# Altium footprint library Connectors.PcbLib: 319 footprints (part 14 of 20)
Each footprint in its own frame and in the unit in brackets; x right, y up, seen from the top. Pads: shape width x height; smd on the part's side, far side on the other; paste and mask are expansions set on the pad; w line width, h text height; cw(c..) or ccw(c..) is an arc to the next point about the centre after c.
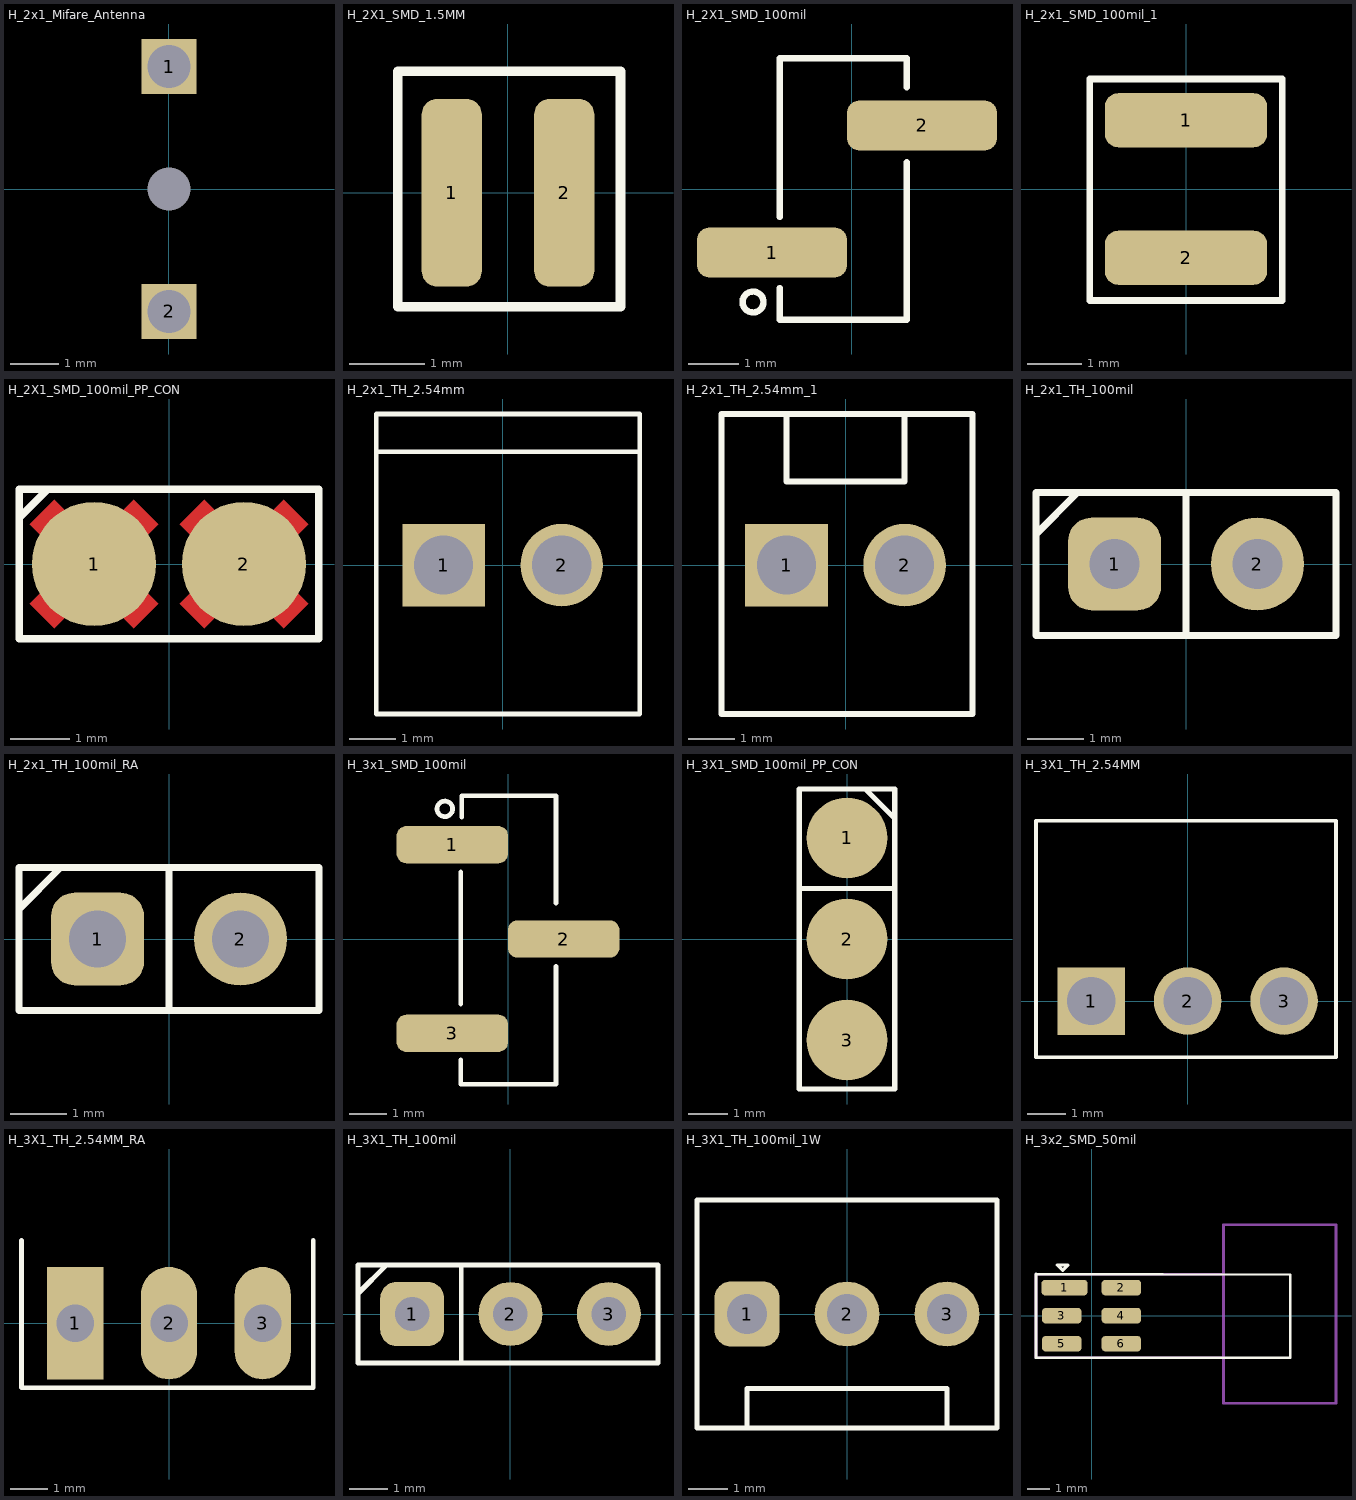
[diagram p13: the footprints below, top view; thin cyan lines are the x and y axes]

## H_2x1_Mifare_Antenna [mil] "/ 20190920 / M-X.Arias"
pads (3):
  rect 45x45 hole 35: 1(0,100) 2(0,-100)
  round 32 hole 35 unplated paste-99999 mask+4: ""(0,0)

## H_2X1_SMD_1.5MM [mm] "/20210114/J-E.Pachon"
pads (2):
  rrect50% 0.8x2.5 smd: 1(-0.75,0) 2(0.75,0)
Top Overlay:
  lines w0.127: -1.47,-1.52 -1.47,1.62 1.5,1.62 1.5,-1.52 -1.47,-1.52

## H_2X1_SMD_100mil [mm] "/ 20221215 / J-A.Sepulveda"
pads (2):
  rrect50% 3x1 smd: 1(-1.6,-1.27) 2(1.4,1.27)
Top Overlay:
  circle w0.127: c-1.98,-2.261 r0.209
  lines w0.127: -1.446,-1.981 -1.446,-2.616 1.094,-2.616 1.094,0.533 ; -1.446,-0.559 -1.446,2.616 1.094,2.616 1.094,2.032
3D body "CONN HEADER SMD 2POS 2.54MM.stp": height 9.66, standoff 0.01, extent -2.5,-2.525 2.3,2.525

## H_2x1_SMD_100mil_1 [mm] "/ 20210701 / J-E.Pachon"
pads (2):
  rrect50% 3x1 smd: 1(0,1.27) 2(0,-1.27)
Top Overlay:
  lines w0.127: -1.778,-2.057 1.778,-2.057 1.778,2.032 -1.778,2.032 -1.778,-2.057

## H_2X1_SMD_100mil_PP_CON [mm] "/ 20190222 / C-A.Serna.A"
pads (2):
  round 2.1 smd mask-0.05: 1(-1.27,0) 2(1.27,0)
Top Layer:
  region: 2.366,0.672 1.942,1.096 0.174,-0.672 0.598,-1.096
  region: 1.942,-1.096 2.366,-0.672 0.598,1.096 0.174,0.672
  region: -0.598,-1.096 -0.174,-0.672 -1.942,1.096 -2.366,0.672
  region: -2.366,-0.672 -1.942,-1.096 -0.174,0.672 -0.598,1.096
Top Overlay:
  lines w0.127: -2.535,0.785 -2.06,1.26 ; -2.54,-1.27 -2.54,1.27 2.54,1.27 2.54,-1.27 -2.54,-1.27

## H_2x1_TH_2.54mm [mil] "/ 20200520 / J-E.Pachon"
pads (2):
  rect 70x70 hole 50: 1(-50,0)
  round 70 hole 50: 2(50,0)
Top Overlay:
  lines w3.94: -107,96 114,96 ; -107,-126 -107,128 116,128 116,-126 -107,-126
3D body "022232021.stp": height 395.5, standoff -164.5, extent -95.12,-127.08 98.88,122.92

## H_2x1_TH_2.54mm_1 [mil] "/ 20220804 / J-E.Pachon"
pads (2):
  rect 70x70 hole 50: 1(-50,0)
  round 70 hole 50: 2(50,0)
Top Overlay:
  lines w5: -50,128 -50,70.87 50,70.87 50,128 ; -105.12,-126 -105.12,128 107.48,128 107.48,-126 -105.12,-126
3D body "022272021.stp": height 461.13, standoff -139.65, extent -98.81,-114.17 101.19,114.18

## H_2x1_TH_100mil [mil] "/ 20190222 / C-A.Serna.A"
pads (2):
  rrect50% 65x65 hole 35: 1(-50,0)
  round 65 hole 35: 2(50,0)
Top Overlay:
  lines w5: -105,20.87 -75.87,50 ; 0,-50 0,50 ; -105,-50 105,-50 105,50 -105,50 -105,-50

## H_2x1_TH_100mil_RA [mil] "/ 20190515/ V-A.Patino"
pads (2):
  rrect50% 65x65 hole 40: 1(-50,0)
  round 65 hole 40: 2(50,0)
Top Overlay:
  lines w5: -105,20.87 -75.87,50 ; 0,-50 0,50 ; -105,-50 105,-50 105,50 -105,50 -105,-50
3D body "022289020.stp": height 98.5, standoff -134.5, extent -100.4,-22.12 99.6,402.38

## H_3x1_SMD_100mil [mm] "/ 20190222 / C-A.Serna.A"
pads (3):
  rrect50% 3x1 smd: 1(-1.5,2.54) 2(1.5,0) 3(-1.5,-2.54)
Top Overlay:
  circle w0.127: c-1.702,3.505 r0.209
  lines w0.127: -1.27,-3.912 -1.27,-3.251 ; -1.27,-1.753 -1.27,1.803 ; -1.245,-3.912 1.295,-3.912 1.295,-0.737 ; -1.245,3.277 -1.245,3.861 1.295,3.861 1.295,0.965

## H_3X1_SMD_100mil_PP_CON [mil] "/ 20190222 / C-A.Serna.A"
pads (3):
  round 80 smd: 1(0,100) 2(0,0) 3(0,-100)
Top Overlay:
  lines w5: -47.24,50 47.24,50 ; 18.11,148.43 47.24,119.29 ; -47.24,-148.43 -47.24,148.43 47.24,148.43 47.24,-148.43 -47.24,-148.43

## H_3X1_TH_2.54MM [mil] "/20210218/J-E.Pachon"
pads (3):
  rect 70x70 hole 50: 1(-100,0)
  round 70 hole 50: 2(0,0) 3(100,0)
Top Overlay:
  lines w3.94: -157.39,-58.27 -157.39,187.01 153.94,187.01 153.94,-58.27 -157.39,-58.27
3D body "022289033.stp": height 98.5, standoff -134.5, extent -152.36,-22.51 147.64,481.99

## H_3X1_TH_2.54MM_RA [mil] "/20210826/N-A.Potosi"
pads (3):
  rect 60x120 hole 40: 1(-100,0)
  oval 60x120 / inner round 0 / far side oval 60x120 hole 40: 2(0,0) 3(100,0)
Top Overlay:
  lines w5: -157.39,88.48 -157.39,-69 153.94,-69 153.94,88.48
3D body "022289033.stp": height 98.5, standoff -134.5, extent -152.36,-22.51 147.64,481.99

## H_3X1_TH_100mil [mil] "/ 20221228 / J-A.Sepulveda"
pads (3):
  rrect50% 65x65 hole 35: 1(-100,0)
  round 65 hole 35: 2(0,0) 3(100,0)
Top Overlay:
  lines w5: -155,20.87 -125.87,50 ; -50,-50 -50,50 ; -155,-50 -155,50 150,50 150,-50 -155,-50
3D body "5-146278-3--3DModel-STEP-1.STEP": height 320.5, standoff -119.5, extent -142,-46 142,46

## H_3X1_TH_100mil_1W [mil] "/20200319/C-A.Serna.A"
pads (3):
  rrect50% 65x65 hole 40: 1(-100,0)
  round 65 hole 40: 2(0,0) 3(100,0)
Top Overlay:
  lines w5: 100,-114.17 100,-74.63 -100,-74.63 -100,-114.17 -150.01,-114.17 ; -150.01,-114.17 -150.01,114.17 149.99,114.17 149.99,-114.17 -150.01,-114.17
3D body "022272031.stp": height 461.13, standoff -139.65, extent -150.01,-114.17 149.99,114.17

## H_3x2_SMD_50mil [mm] "/ 202000406/ C-A.Serna.A"
pads (6):
  rrect50% 2.1x0.7 smd: 1(-1.225,1.27)
  rrect50% 1.8x0.7 smd: 2(1.35,1.27) 3(-1.35,0) 4(1.35,0) 5(-1.35,-1.27) 6(1.35,-1.27)
Top Overlay:
  lines w0.127: -2.52,-1.905 -2.52,1.894 9.01,1.858 9.01,-1.905 -2.52,-1.905
  lines w0.152: -1.549,2.298 -1.309,2.058 -1.069,2.298 -1.549,2.298
Mechanical 15:
  lines w0.127: 11.08,-1.783 11.08,2.027 ; -2.52,-1.905 -2.52,1.894 5.98,1.868 5.98,-1.905 -2.52,-1.905 ; 5.98,-3.974 5.98,4.126 11.08,4.126 11.08,-3.974 5.98,-3.974
3D body "FTSH-103-01-L-DH.stp": height 3.44, standoff 0.01, extent -1.914,-1.875 8.982,1.935
3D body "J202_3X2_Female-header.step": height 4.34, standoff 0.24, extent 5.98,-3.974 11.08,4.126